# Altium integrated library TSW-105-07-L-S (1).IntLib: 1 symbol
Pins are listed as number, name and electrical type; pins without a type are passive.

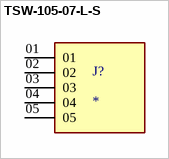
[diagram p0: symbol TSW-105-07-L-S]

## TSW-105-07-L-S
designator J?
MF: Samtec; MP: TSW-105-07-L-S; Price: None; Value: *; Package: None; Availability: Unavailable
footprint SAMTEC_TSW-105-07-L-S
pins: 01, 02, 03, 04, 05